# Altium footprint library 5.50-蜂鸣器.PcbLib: 1 footprints
Each footprint in its own frame and in the unit in brackets; x right, y up, seen from the top. Pads: shape width x height; smd on the part's side, far side on the other; paste and mask are expansions set on the pad; w line width, h text height; cw(c..) or ccw(c..) is an arc to the next point about the centre after c.
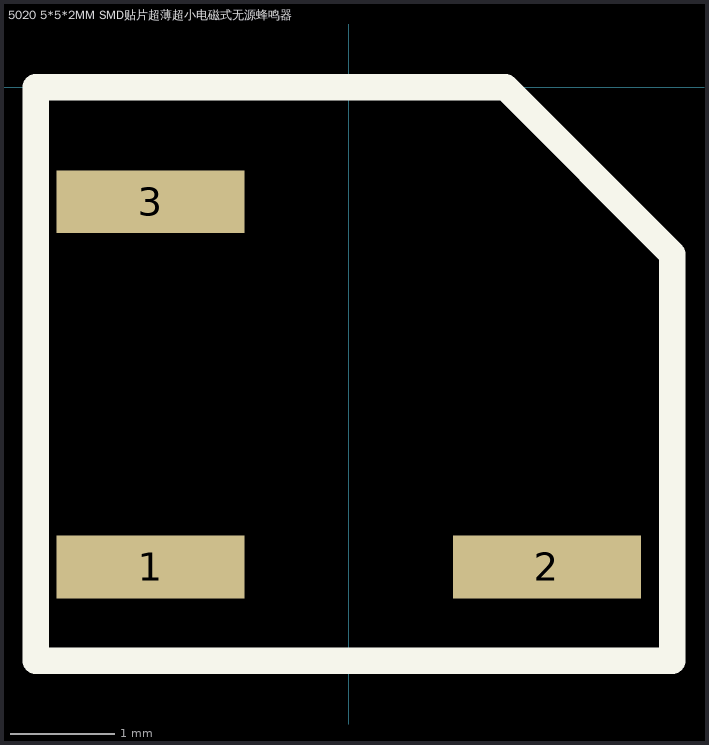
[diagram p0: the footprint, top view; thin cyan lines are the x and y axes]

## 5020 5*5*2MM SMD贴片超薄超小电磁式无源蜂鸣器 [mm] "5020 5*5*2MM SMD贴片超薄超小电磁式无源蜂鸣器"
height 0.051
pads (3):
  rect 1.8x0.6 smd paste+0 mask+0.102: 1(-1.9,-4.6) 2(1.9,-4.6) 3(-1.9,-1.1)
Top Overlay:
  lines w0.254: -3,-5.5 3.1,-5.5 3.1,-1.6 1.5,0 -3,0 -3,-5.5
3D body "User Library-BEEP-5020.STEP": height 2, standoff -0.1, extent -2.6,-5.4 2.6,-0.2